# Altium footprint library AVP32F08_EVM_Rev1.1.PcbLib: 50 footprints (part 3 of 4)
Each footprint in its own frame and in the unit in brackets; x right, y up, seen from the top. Pads: shape width x height; smd on the part's side, far side on the other; paste and mask are expansions set on the pad; w line width, h text height; cw(c..) or ccw(c..) is an arc to the next point about the centre after c.
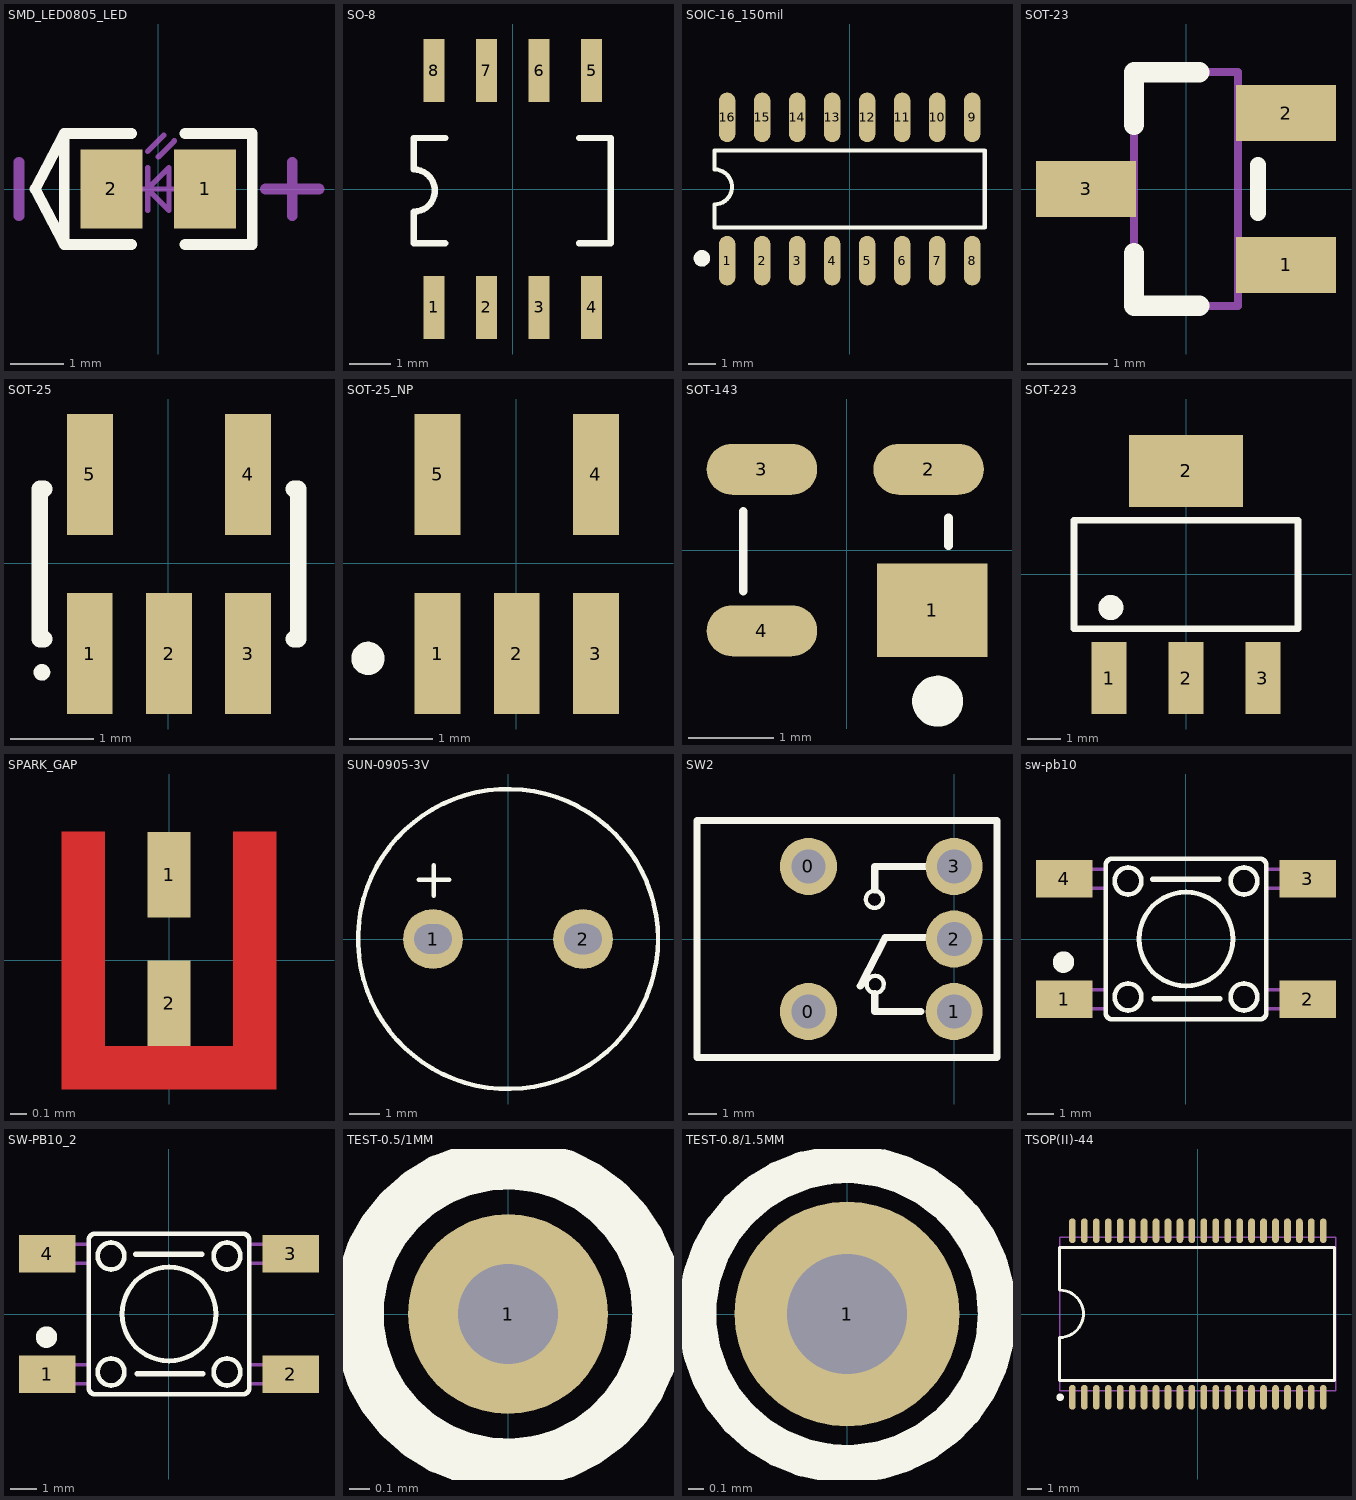
[diagram p2: the footprints below, top view; thin cyan lines are the x and y axes]

## SMD_LED0805_LED [mm]
height 8
pads (2):
  rect 1.16x1.47 smd: 1(0.875,0) 2(-0.875,0)
Top Overlay:
  lines w0.2: -0.5,-1.035 -1.755,-1.035 ; -0.5,1.035 -1.755,1.035 ; 0.5,-1.035 1.755,-1.035 1.755,1.035 0.5,1.035 ; -1.755,-1.035 -1.755,1.035 ; -1.755,-1.035 -2.3,0 -1.755,1.035
Mechanical 13:
  lines w0.1: -0.4,0 0.4,0 ; -0.2,-0.4 -0.2,0.4 ; -0.2,0.7 0.1,1 ; 0,0.6 0.3,0.9 ; -0.2,0 0.2,0.4 0.2,-0.4 -0.2,0
Mechanical 15:
  lines w0.203: -2.6,-0.5 -2.6,0.5 ; 2,0 3,0 ; 2.5,-0.5 2.5,0.5
3D body "User Library-led_0805.step": height 1.1, standoff 0, extent -1.01,-0.625 1.01,0.625

## SO-8 [mil]
pads (8):
  rect 20x60 smd: 1(-75,-112.5) 2(-25,-112.5) 3(25,-112.5) 4(75,-112.5) 5(75,112.5) 6(25,112.5) 7(-25,112.5) 8(-75,112.5)
Top Overlay:
  lines w6: -64,-51.5 -94,-51.5 -94,-21.5 ccw(c-94,-1.5) -94,18.5 -94,48.5 -64,48.5 ; 63,-51.5 93,-51.5 93,48.5 63,48.5
3D body "m08a.stp": height 63.98, standoff 0, extent -96.45,-111.1 96.46,125.12

## SOIC-16_150mil [mm]
height 6.34
pads (16):
  oval 0.6x1.8 smd: 1(-4.445,-2.6) 2(-3.175,-2.6) 3(-1.905,-2.6) 4(-0.635,-2.6) 5(0.635,-2.6) 6(1.905,-2.6) 7(3.175,-2.6) 8(4.445,-2.6) 9(4.445,2.6) 10(3.175,2.6) 11(1.905,2.6) 12(0.635,2.6) 13(-0.635,2.6) 14(-1.905,2.6) 15(-3.175,2.6) 16(-4.445,2.6)
Top Overlay:
  circle w0.3: c-5.359,-2.515 r0.15
  lines w0.15: -4.902,1.397 -4.902,0.711 cw(c-4.902,0.076) -4.902,-0.559 -4.902,-1.397 -4.899,-1.4 4.9,-1.4 4.9,1.4 -4.9,1.4
3D body "SW3DPS-SO-16-DEFAULT.step": height 1.45, standoff 0, extent -5.004,-2.8 4.978,3.105

## SOT-23 [mm]
height 6.5
pads (3):
  rect 1.25x0.7 smd: 1(1.25,-0.95) 2(1.25,0.95) 3(-1.25,0)
Top Overlay:
  lines w0.2: 0.9,-0.3 0.9,0.3
  lines w0.254: -0.65,-0.8 -0.65,-1.46 0.165,-1.46 ; 0.165,1.46 -0.65,1.46 ; -0.65,0.8 -0.65,1.46 ; -0.65,0.8 -0.65,1.46 ; -0.65,0.8 -0.65,1.46
Mechanical 13:
  lines w0.1: -0.65,-1.46 -0.65,1.46 ; -0.65,-1.46 0.65,-1.46 ; -0.65,-1.46 0.65,-1.46 ; -0.65,-1.46 -0.65,1.46 ; -0.65,-1.46 0.65,-1.46 ; -0.65,-1.46 -0.65,1.46 ; -0.65,1.46 0.65,1.46 ; -0.65,1.46 0.65,1.46 ; -0.65,1.46 0.65,1.46 ; 0.65,-1.46 0.65,1.46 ; 0.65,-1.46 0.65,1.46 ; 0.65,-1.46 0.65,1.46
3D body "SOT-23.step": height 1.3, standoff 0, extent -1.5,-1.5 1.5,1.5

## SOT-25 [mm]
height 6.34
pads (5):
  rect 0.55x1.45 smd: 1(-0.942,-1.085) 2(0.008,-1.085) 3(0.958,-1.085) 4(0.958,1.065) 5(-0.942,1.065)
Top Overlay:
  circle w0.1: c-1.517,-1.31 r0.05
  lines w0.2: -1.492,-0.91 -1.542,-0.91 -1.542,0.89 -1.492,0.89 ; 1.508,-0.91 1.558,-0.91 1.558,0.89 1.508,0.89
3D body "SOT-23-5.STEP": height 1.2, standoff 0, extent -1.45,-1.324 1.45,1.476

## SOT-25_NP [mm]
height 6.34
pads (5):
  rect 0.55x1.45 smd: 1(-0.942,-1.085) 2(0.008,-1.085) 3(0.958,-1.085) 4(0.958,1.065) 5(-0.942,1.065)
Top Overlay:
  circle w0.2: c-1.778,-1.143 r0.1
3D body "SOT-23-5.STEP": height 1.2, standoff 0, extent -1.45,-1.324 1.45,1.476

## SOT-143 [mm]
height 6.34
pads (4):
  rect 1.3x1.1 smd: 1(1,-0.71)
  oval 1.3x0.6 smd: 2(0.96,0.95) 3(-1,0.95) 4(-1,-0.95)
Top Overlay:
  circle w0.3: c1.067,-1.778 r0.15
  lines w0.102: -1.219,-0.483 -1.219,0.457 ; 1.194,0.051 1.194,0.381
3D body "User Library-SOT-143.STEP": height 1, standoff 0, extent -1.23,-1.46 1.19,1.46

## SOT-223 [mm] "SOT-223/SC-73; 4 Leads; Body 6.7 x 7.3 mm, inc. leads (LxW max)"
height 1.7
pads (4):
  rect 1.05x2.15 smd: 1(-2.3,-3.1) 2(0,-3.1) 3(2.3,-3.1)
  rect 3.4x2.15 smd: 2(0,3.1)
Top Overlay:
  circle w0.5: c-2.249,-0.991 r0.125
  lines w0.2: -3.35,-1.625 3.35,-1.625 3.35,1.625 -3.35,1.625 -3.35,-1.625
3D body "User Library-SOT-223-2.STEP": height 1.85, standoff -0.05, extent -3.295,-3.497 3.405,3.708

## SPARK_GAP [mil] "无Paste层"
pads (2):
  rect 10x20 smd paste-39.37: 1(0,20) 2(0,-10)
Top Layer:
  region: -15,30 -25,30 -25,-30 25,-30 25,30 15,30 15,-20 -15,-20
Top Solder:
  region: -25,-30 25,-30 25,40 -25,40

## SUN-0905-3V [mm] "蜂鸣器/9.6*5 有源 3V 电磁蜂鸣器"
height 5
pads (2):
  round 2 hole 1 slot 1.25 at 0 deg: 1(-2.5,0) 2(2.5,0)
Top Overlay:
  circle w0.15: c0,0 r5
  lines w0.15: -2.972,1.967 -1.956,1.967 ; -2.475,1.448 -2.475,2.464
3D body: height 6, standoff 0, extent -4.994,-4.998 5,4.999
3D body: height 6.05, standoff 1.05, extent -0.75,-0.747 0.75,0.748

## SW2 [mm] "扭子开关单刀无复位无中点"
height 8
pads (5):
  round 2 hole 1.2: 0(-5.1,-2.54) 0(-5.1,2.54) 1(0,-2.54) 2(0,0) 3(0,2.54)
Top Overlay:
  lines w0.15: -2.489,1.386 cw(c-2.789,1.386) -2.489,1.397 ; -2.464,-1.6 cw(c-2.764,-1.589) -2.464,-1.589
  lines w0.254: -3.288,-1.647 -2.413,0.051 -0.152,0.051 -0.025,-0.076 ; -2.781,-1.905 -2.781,-2.541 -1.168,-2.541 ; -2.781,1.727 -2.781,2.541 -0.203,2.541 ; -9,-4.15 1.5,-4.15 1.5,4.15 -9,4.15 -9,-4.15
3D body "User Library-switch et spdt.STEP": height 5.96, standoff -3.48, extent -26.098,-4.115 0.698,4.013

## sw-pb10 [mm] "SMD"
pads (4):
  rect 2.1x1.4 smd: 1(-4.55,-2.25) 2(4.55,-2.25) 3(4.55,2.25) 4(-4.55,2.25)
Top Overlay:
  circle w0.4: c-4.572,-0.864 r0.2
  lines w0.178: -3,-2.75 ccw(c-2.75,-2.75) -2.75,-3 2.75,-3 ccw(c2.75,-2.75) 3,-2.75 3,2.75 ccw(c2.75,2.75) 2.75,3 -2.75,3 ccw(c-2.75,2.75) -3,2.75 -3,-2.75 ; -2.165,-2.665 ccw(c-2.165,-2.165) -2.165,-1.665 ccw(c-2.165,-2.165) -2.165,-2.665 ; -2.165,1.665 ccw(c-2.165,2.165) -2.165,2.665 ccw(c-2.165,2.165) -2.165,1.665 ; 0,-1.75 ccw(c0,0) 0,1.75 ccw(c0,0) 0,-1.75 ; 2.165,-2.665 ccw(c2.165,-2.165) 2.165,-1.665 ccw(c2.165,-2.165) 2.165,-2.665 ; 2.165,1.665 cw(c2.165,2.165) 2.165,2.665 cw(c2.165,2.165) 2.165,1.665
  lines w0.2: -1.245,2.235 1.219,2.235 ; -1.194,-2.235 1.27,-2.235
Mechanical 5:
  lines w0.127: -3,-2.6 -3.4,-2.6 -3.95,-2.6 ; -3,-1.9 -3.4,-1.9 -3.95,-1.9 ; -3,1.9 -3.4,1.9 -3.95,1.9 ; -3,2.6 -3.4,2.6 -3.95,2.6 ; 3,-2.6 3.4,-2.6 3.95,-2.6 ; 3,-1.9 3.4,-1.9 3.95,-1.9 ; 3,1.9 3.4,1.9 3.95,1.9 ; 3,2.6 3.4,2.6 3.95,2.6 ; -3.95,-2.6 -3.95,-1.9 ; -3.95,-2.6 -4.2,-2.6 -5,-2.6 -5,-1.9 -4.2,-1.9 -3.95,-1.9 ; -3.95,1.9 -3.95,2.6 ; -3.95,1.9 -4.2,1.9 -5,1.9 -5,2.6 -4.2,2.6 -3.95,2.6 ; 3.95,-2.6 3.95,-1.9 ; 3.95,-2.6 4.2,-2.6 5,-2.6 5,-1.9 4.2,-1.9 3.95,-1.9 ; 3.95,1.9 3.95,2.6 ; 3.95,1.9 4.2,1.9 5,1.9 5,2.6 4.2,2.6 3.95,2.6 ; -3,-2.75 ccw(c-2.75,-2.75) -2.75,-3 2.75,-3 ccw(c2.75,-2.75) 3,-2.75 3,2.75 ccw(c2.75,2.75) 2.75,3 -2.75,3 ccw(c-2.75,2.75) -3,2.75 -3,-2.75 ; -2.165,-2.665 cw(c-2.165,-2.165) -2.165,-1.665 cw(c-2.165,-2.165) -2.165,-2.665 ; -2.165,1.665 cw(c-2.165,2.165) -2.165,2.665 cw(c-2.165,2.165) -2.165,1.665 ; 0,-1.75 cw(c0,0) 0,1.75 cw(c0,0) 0,-1.75 ; 2.165,-2.665 cw(c2.165,-2.165) 2.165,-1.665 cw(c2.165,-2.165) 2.165,-2.665 ; 2.165,1.665 ccw(c2.165,2.165) 2.165,2.665 ccw(c2.165,2.165) 2.165,1.665
3D body "User Library-FSM4JSMATR - TE Connectivity - SPST 6mm Tactile Switch.STEP": height 4.97, standoff 0, extent -4.996,-3 5.004,3

## SW-PB10_2 [mm]
pads (4):
  rect 2.1x1.4 smd: 1(-4.55,-2.25) 2(4.55,-2.25) 3(4.55,2.25) 4(-4.55,2.25)
Top Overlay:
  circle w0.4: c-4.572,-0.864 r0.2
  lines w0.178: -3,-2.75 ccw(c-2.75,-2.75) -2.75,-3 2.75,-3 ccw(c2.75,-2.75) 3,-2.75 3,2.75 ccw(c2.75,2.75) 2.75,3 -2.75,3 ccw(c-2.75,2.75) -3,2.75 -3,-2.75 ; -2.165,-2.665 ccw(c-2.165,-2.165) -2.165,-1.665 ccw(c-2.165,-2.165) -2.165,-2.665 ; -2.165,1.665 ccw(c-2.165,2.165) -2.165,2.665 ccw(c-2.165,2.165) -2.165,1.665 ; 0,-1.75 ccw(c0,0) 0,1.75 ccw(c0,0) 0,-1.75 ; 2.165,-2.665 ccw(c2.165,-2.165) 2.165,-1.665 ccw(c2.165,-2.165) 2.165,-2.665 ; 2.165,1.665 cw(c2.165,2.165) 2.165,2.665 cw(c2.165,2.165) 2.165,1.665
  lines w0.2: -1.245,2.235 1.219,2.235 ; -1.194,-2.235 1.27,-2.235
Mechanical 5:
  lines w0.127: -3,-2.6 -3.4,-2.6 -3.95,-2.6 ; -3,-1.9 -3.4,-1.9 -3.95,-1.9 ; -3,1.9 -3.4,1.9 -3.95,1.9 ; -3,2.6 -3.4,2.6 -3.95,2.6 ; 3,-2.6 3.4,-2.6 3.95,-2.6 ; 3,-1.9 3.4,-1.9 3.95,-1.9 ; 3,1.9 3.4,1.9 3.95,1.9 ; 3,2.6 3.4,2.6 3.95,2.6 ; -3.95,-2.6 -3.95,-1.9 ; -3.95,-2.6 -4.2,-2.6 -5,-2.6 -5,-1.9 -4.2,-1.9 -3.95,-1.9 ; -3.95,1.9 -3.95,2.6 ; -3.95,1.9 -4.2,1.9 -5,1.9 -5,2.6 -4.2,2.6 -3.95,2.6 ; 3.95,-2.6 3.95,-1.9 ; 3.95,-2.6 4.2,-2.6 5,-2.6 5,-1.9 4.2,-1.9 3.95,-1.9 ; 3.95,1.9 3.95,2.6 ; 3.95,1.9 4.2,1.9 5,1.9 5,2.6 4.2,2.6 3.95,2.6 ; -3,-2.75 ccw(c-2.75,-2.75) -2.75,-3 2.75,-3 ccw(c2.75,-2.75) 3,-2.75 3,2.75 ccw(c2.75,2.75) 2.75,3 -2.75,3 ccw(c-2.75,2.75) -3,2.75 -3,-2.75 ; -2.165,-2.665 cw(c-2.165,-2.165) -2.165,-1.665 cw(c-2.165,-2.165) -2.165,-2.665 ; -2.165,1.665 cw(c-2.165,2.165) -2.165,2.665 cw(c-2.165,2.165) -2.165,1.665 ; 0,-1.75 cw(c0,0) 0,1.75 cw(c0,0) 0,-1.75 ; 2.165,-2.665 cw(c2.165,-2.165) 2.165,-1.665 cw(c2.165,-2.165) 2.165,-2.665 ; 2.165,1.665 ccw(c2.165,2.165) 2.165,2.665 ccw(c2.165,2.165) 2.165,1.665
3D body "User Library-FSM4JSMATR - TE Connectivity - SPST 6mm Tactile Switch.STEP": height 4.97, standoff 0, extent -4.996,-3 5.004,3

## TEST-0.5/1MM [mm]
height 5
pads (1):
  round 1 hole 0.5: 1(0,0)
Top Overlay:
  circle w0.254: c0,0 r0.75

## TEST-0.8/1.5MM [mm]
height 5.5
pads (1):
  round 1.5 hole 0.8: 1(0,0)
Top Overlay:
  circle w0.254: c0,0 r1

## TSOP(II)-44 [mm] "SRAM"
height 8
pads (44):
  oval 0.45x1.65 smd: 1(-8.4,-5.575) 2(-7.6,-5.575) 3(-6.8,-5.575) 4(-6,-5.575) 5(-5.2,-5.575) 6(-4.4,-5.575) 7(-3.6,-5.575) 8(-2.8,-5.575) 9(-2,-5.575) 10(-1.2,-5.575) 11(-0.4,-5.575) 12(0.4,-5.575) 13(1.2,-5.575) 14(2,-5.575) 15(2.8,-5.575) 16(3.6,-5.575) 17(4.4,-5.575) 18(5.2,-5.575) 19(6,-5.575) 20(6.8,-5.575) 21(7.6,-5.575) 22(8.4,-5.575) 23(8.4,5.575) 24(7.6,5.575) 25(6.8,5.575) 26(6,5.575) 27(5.2,5.575) 28(4.4,5.575) 29(3.6,5.575) 30(2.8,5.575) 31(2,5.575) 32(1.2,5.575) 33(0.4,5.575) 34(-0.4,5.575) 35(-1.2,5.575) 36(-2,5.575) 37(-2.8,5.575) 38(-3.6,5.575) 39(-4.4,5.575) 40(-5.2,5.575) 41(-6,5.575) 42(-6.8,5.575) 43(-7.6,5.575) 44(-8.4,5.575)
Top Overlay:
  circle w0.25: c-9.225,-5.575 r0.125
  lines w0.2: -9.25,-4.448 -9.25,-1.572 ccw(c-9.25,0.013) -9.25,1.598 -9.25,4.452 9.165,4.452 9.165,-4.448 -9.25,-4.448
Mechanical 13:
  lines w0.1: -9.25,-5.15 9.25,-5.15 9.25,5.15 -9.25,5.15 -9.25,-5.15
3D body "User Library-TSOP2-44_IS.STEP": height 1.3, standoff -0.09, extent -9.08,-5.969 9.13,5.791